# Altium schematic symbol library 744043100.SchLib: 1 symbol
Pins are listed as number, name and electrical type; pins without a type are passive.

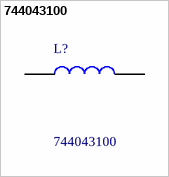
[diagram p0: symbol 744043100]

## 744043100
designator L?
WE-TPC SMT Shielded Tiny Power Inductor Size 4828; L = 10 H ; IR = 1.19 A; Isat = 1 A; RDC = 110 m; Manufacturer_Name: Wurth Elektronik; Geometry.Height: 2.8mm; Manufacturer_Part_Number: 744043100; Mouser Part Number: 710-744043100; Mouser Price/Stock: https://www.mouser.co.uk/ProductDetail/Wurth-Elektronik/744043100?qs=PGXP4M47uW67U3yLBymoaw%3D%3D; Arrow Part Number: *; Arrow Price/Stock: *; Datasheet Link: https://www.we-online.com/catalog/datasheet/744043100.pdf
footprint INDPM4848X280N
pins: 1, 2